# Altium schematic symbol library 6Cnts-S.SchLib: 1 symbol
Pins are listed as number, name and electrical type; pins without a type are passive.

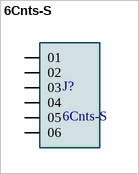
[diagram p0: symbol 6Cnts-S]

## 6Cnts-S
designator J?
MF: Samtec Inc.; MP: TSW-106-XX-X-S; Availability: Unavailable; Package: None; Price: None; Value: *
footprint 6Cnts-S
pins: 01, 02, 03, 04, 05, 06